# Altium footprint library SAMTEC_TSM-104-01-L-SV.PcbLib: 1 footprints
Each footprint in its own frame and in the unit in brackets; x right, y up, seen from the top. Pads: shape width x height; smd on the part's side, far side on the other; paste and mask are expansions set on the pad; w line width, h text height; cw(c..) or ccw(c..) is an arc to the next point about the centre after c.
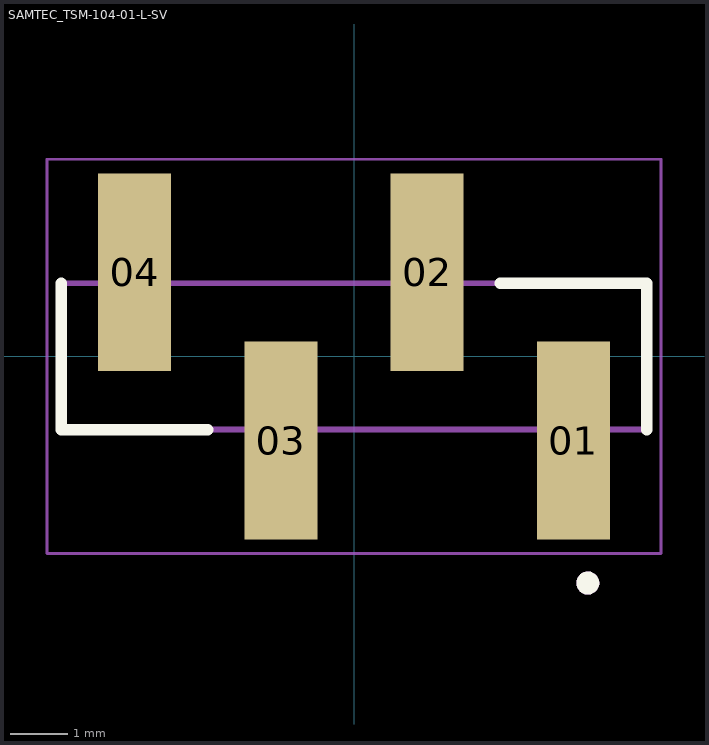
[diagram p0: the footprint, top view; thin cyan lines are the x and y axes]

## SAMTEC_TSM-104-01-L-SV [mm]
pads (4):
  rect 1.27x3.43 smd: 01(3.81,-1.46) 02(1.27,1.46) 03(-1.27,-1.46) 04(-3.81,1.46)
Top Overlay:
  circle w0.2: c4.06,-3.935 r0.1
  lines w0.2: -5.08,1.27 -5.08,-1.27 -2.54,-1.27 ; 2.54,1.27 5.08,1.27 5.08,-1.27
Mechanical 13:
  circle w0.2: c4.06,-3.935 r0.1
  lines w0.1: -5.08,-1.27 5.08,-1.27 5.08,1.27 -5.08,1.27 -5.08,-1.27
Mechanical 15:
  lines w0.05: -5.33,-3.425 5.33,-3.425 5.33,3.425 -5.33,3.425 -5.33,-3.425